# Altium footprint library JacksXBEE.PcbLib: 1 footprints
Each footprint in its own frame and in the unit in brackets; x right, y up, seen from the top. Pads: shape width x height; smd on the part's side, far side on the other; paste and mask are expansions set on the pad; w line width, h text height; cw(c..) or ccw(c..) is an arc to the next point about the centre after c.
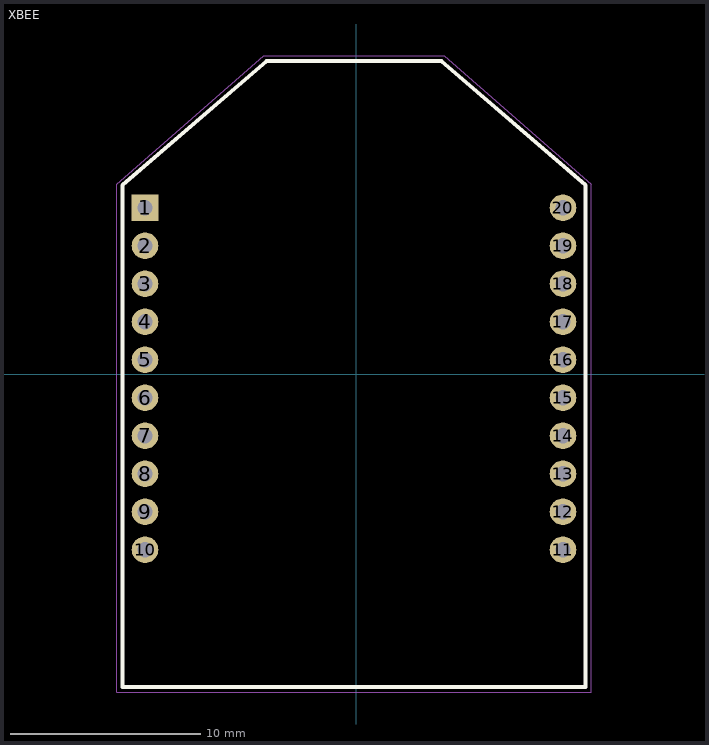
[diagram p0: the footprint, top view; thin cyan lines are the x and y axes]

## XBEE [mm]
pads (20):
  rect 1.4x1.4 hole 0.8: 1(-11.127,8.75)
  round 1.4 hole 0.8: 2(-11.127,6.75) 3(-11.127,4.75) 4(-11.127,2.75) 5(-11.127,0.75) 6(-11.127,-1.25) 7(-11.127,-3.25) 8(-11.127,-5.25) 9(-11.127,-7.25) 10(-11.127,-9.25) 11(10.873,-9.25) 12(10.873,-7.25) 13(10.873,-5.25) 14(10.873,-3.25) 15(10.873,-1.25) 16(10.873,0.75) 17(10.873,2.75) 18(10.873,4.75) 19(10.873,6.75) 20(10.873,8.75)
Top Overlay:
  lines w0.2: -12.317,-16.47 12.063,-16.47 12.063,9.94 4.473,16.47 -4.727,16.47 -12.317,9.94 -12.317,-16.47
Mechanical 15:
  lines w0.05: -12.627,-16.75 -12.627,10 -4.877,16.75 4.623,16.75 12.373,10 12.373,-16.75 -12.627,-16.75
3D body "XBP9B-DPST-001--3DModel-STEP-56544.STEP": height 7.67, standoff -4.06, extent -12.319,-16.472 12.065,29.172